# Altium footprint library SYNCBOX_TST.PcbLib: 267 footprints (part 13 of 17)
Each footprint in its own frame and in the unit in brackets; x right, y up, seen from the top. Pads: shape width x height; smd on the part's side, far side on the other; paste and mask are expansions set on the pad; w line width, h text height; cw(c..) or ccw(c..) is an arc to the next point about the centre after c.
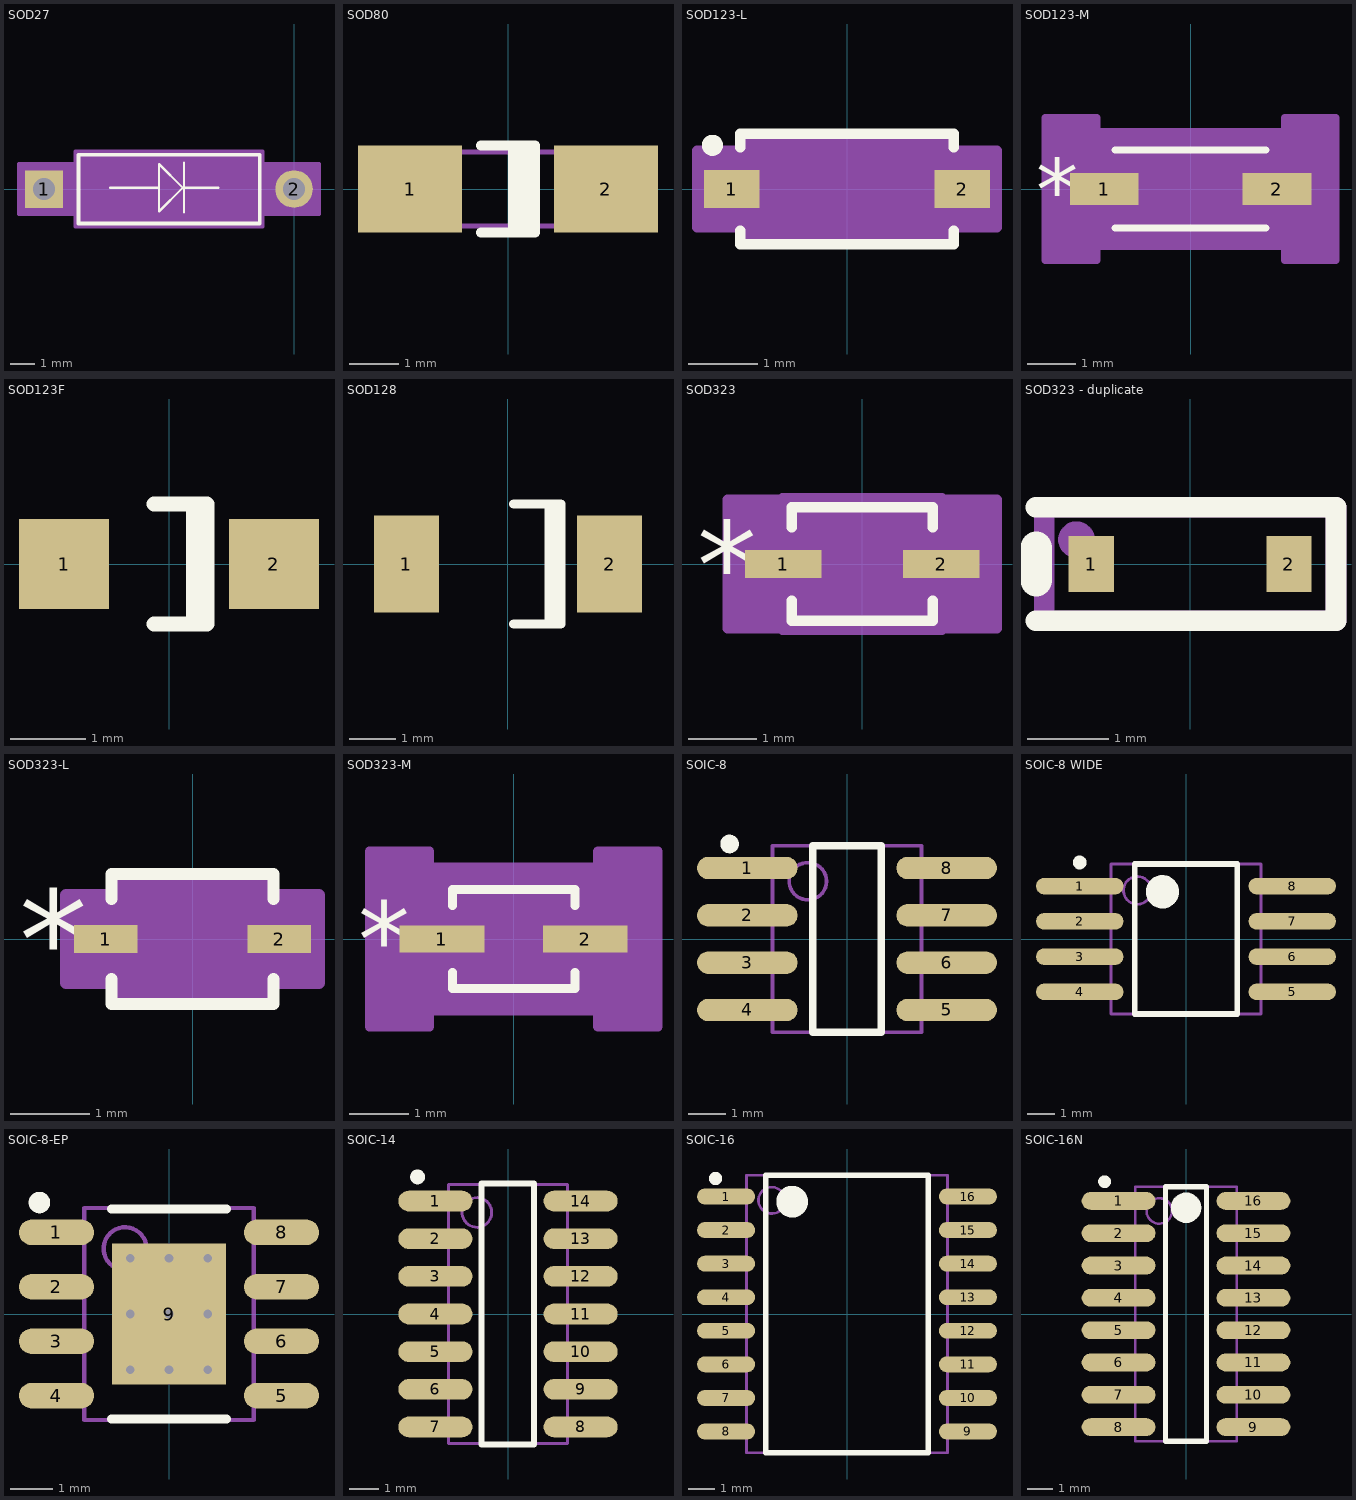
[diagram p12: the footprints below, top view; thin cyan lines are the x and y axes]

## SOD27 [mil]
pads (2):
  rect 60x60 / inner round 60 / far side rect 60x60 hole 35 paste+0 mask+0: 1(-400,0)
  round 60 hole 35 paste+0 mask+0: 2(0,0)
Top Overlay:
  lines w3.94: -294,2 -216,2 ; -176,-37 -176,42 ; -121,2 -178,2 ; -178,2 -216,40 -216,-36 -178,2
  lines w6: -345,-55 -55,-55 -55,55 -345,55 -345,-55
Mechanical 13:
  lines w1: -400,0 -340,0 ; -60,0 0,0 ; -340,-50 -60,-50 -60,50 -340,50 -340,-50
Mechanical 15:
  region: -350,-40 -440,-40 -440,40 -350,40 -350,60 -50,60 -50,40 40,40 40,-40 -50,-40 -50,-60 -350,-60
  lines w6: -440,-40 -440,40 -350,40 -350,60 -50,60 -50,40 40,40 40,-40 -50,-40 -50,-60 -350,-60 -350,-40 -440,-40
3D body: height 10, standoff 0, extent 0,0 10,10
3D body "SOD27.stp": height 100, standoff -110, extent -415,-50 15,50

## SOD80 [mm] "MELF Diode, 2-Leads, Body 3,4x1,4mm, IPC Low Density"
height 1.5
pads (2):
  rect 2.1x1.75 smd: 1(-1.975,0) 2(1.975,0)
Top Overlay:
  rectangle: 0,-0.875 0.55,0.875
  lines w0.2: -0.55,-0.875 0.55,-0.875 0.55,0.875 -0.55,0.875
Mechanical 13:
  rectangle: 1.316,-0.75 1.8,0.75
  lines w0.1: -1.8,-0.75 1.8,-0.75 1.8,0.75 -1.8,0.75 -1.8,-0.75
3D body: height 1.5, standoff 0, extent -1.8,-0.75 1.8,0.75

## SOD123-L [mm]
pads (2):
  rect 0.806x0.55 smd paste+0 mask+0: 1(-1.674,0) 2(1.674,0)
Top Overlay:
  circle w0.254: c-1.956,0.635 r0.025
  lines w0.152: -1.552,-0.608 -1.552,-0.802 1.552,-0.802 1.552,-0.608 ; -1.552,0.608 -1.552,0.802 1.552,0.802 1.552,0.608
Mechanical 13:
  lines w0.025: -1.425,-0.337 -1.087,-0.675 ; -1.425,0.337 -1.087,0.675 ; -1.925,-0.275 -1.425,-0.275 -1.425,0.275 -1.925,0.275 -1.925,-0.275 ; -1.425,-0.675 -1.425,0.675 1.425,0.675 1.425,-0.675 -1.425,-0.675 ; 1.425,-0.275 1.925,-0.275 1.925,0.275 1.425,0.275 1.425,-0.275
  text "*" at -1.488,-0.635 h1.27
Mechanical 15:
  region: -1.527,-0.556 -2.179,-0.556 -2.179,0.556 -1.527,0.556 -1.527,0.777 1.527,0.777 1.527,0.556 2.179,0.556 2.179,-0.556 1.527,-0.556 1.527,-0.777 -1.527,-0.777
  lines w0.152: -2.179,-0.556 -1.527,-0.556 -1.527,-0.777 1.527,-0.777 1.527,-0.556 2.179,-0.556 2.179,0.556 1.527,0.556 1.527,0.777 -1.527,0.777 -1.527,0.556 -2.179,0.556 -2.179,-0.556
3D body "SOD123-L.stp": height 0.81, standoff 0, extent -1.925,-0.675 1.925,0.675
3D body: height 0.25, standoff 0, extent 0,0 0.254,0.254

## SOD123-M [mm]
pads (2):
  rect 1.416x0.652 smd paste+0 mask+0: 1(-1.776,0) 2(1.776,0)
Top Overlay:
  lines w0.152: -1.552,-0.802 1.552,-0.802 ; -1.552,0.802 1.552,0.802
  text "*" at -3.182,-0.635 h1.27
Mechanical 13:
  lines w0.025: -1.425,-0.337 -1.087,-0.675 ; -1.425,0.337 -1.087,0.675 ; -1.925,-0.275 -1.925,0.275 -1.425,0.275 -1.425,-0.275 -1.925,-0.275 ; -1.425,-0.675 1.425,-0.675 1.425,0.675 -1.425,0.675 -1.425,-0.675 ; 1.425,-0.275 1.425,0.275 1.925,0.275 1.925,-0.275 1.425,-0.275
  text "*" at -1.488,-0.635 h1.27
Mechanical 15:
  region: -1.933,-1.47 -2.992,-1.47 -2.992,1.47 -1.933,1.47 -1.933,1.183 1.933,1.183 1.933,1.47 2.992,1.47 2.992,-1.47 1.933,-1.47 1.933,-1.183 -1.933,-1.183
  lines w0.152: -2.992,-1.47 -2.992,1.47 -1.933,1.47 -1.933,1.183 1.933,1.183 1.933,1.47 2.992,1.47 2.992,-1.47 1.933,-1.47 1.933,-1.183 -1.933,-1.183 -1.933,-1.47 -2.992,-1.47
3D body: height 0.25, standoff 0, extent 0,0 0.254,0.254
3D body "SOD123-M.stp": height 0.81, standoff 0, extent -1.925,-0.675 1.925,0.675

## SOD123F [mm] "1.6 x 2.6 BODY"
height 1.2
pads (2):
  rect 1.2x1.2 smd: 1(-1.4,0) 2(1.4,0)
Top Overlay:
  lines w0.2: -0.2,-0.8 0.508,-0.8 0.508,0.8 -0.2,0.8 ; 0.325,-0.8 0.325,0.8
3D body "CGRKM.stp": height 1.7, standoff 0, extent -1.854,-0.902 1.854,0.902

## SOD128 [mm] "2.5 x 3.8MM BODY"
height 1.1
pads (2):
  rect 1.4x2.1 smd: 1(-2.2,0) 2(2.2,0)
Top Overlay:
  lines w0.2: 0.127,-1.3 1.143,-1.3 ; 0.127,1.3 1.143,1.3 1.143,-1.3 ; 0.889,-1.3 0.889,1.3 1.016,1.173 1.016,-1.173 1.143,-1.3
3D body: height 1.1, standoff 0, extent -2.159,-1.397 2.159,1.397

## SOD323 [mm]
pads (2):
  rect 1.111x0.401 smd paste+0 mask+0: 1(-1.15,0) 2(1.15,0)
Top Overlay:
  lines w0.152: -1.027,-0.533 -1.027,-0.827 1.027,-0.827 1.027,-0.533 ; -1.027,0.533 -1.027,0.827 1.027,0.827 1.027,0.533
  text "*" at -2.404,-0.635 h1.27
Mechanical 13:
  lines w0.025: -0.9,-0.35 -0.55,-0.7 ; -0.9,0.35 -0.55,0.7 ; -1.35,-0.175 -1.35,0.175 -0.9,0.175 -0.9,-0.175 -1.35,-0.175 ; -0.9,-0.7 0.9,-0.7 0.9,0.7 -0.9,0.7 -0.9,-0.7 ; 0.9,-0.175 0.9,0.175 1.35,0.175 1.35,-0.175 0.9,-0.175
  text "*" at -0.964,-0.635 h1.27
Mechanical 15:
  region: -1.154,-0.937 -1.96,-0.937 -1.96,0.937 -1.154,0.937 -1.154,0.954 1.154,0.954 1.154,0.937 1.96,0.937 1.96,-0.937 1.154,-0.937 1.154,-0.954 -1.154,-0.954
  lines w0.152: -1.96,-0.937 -1.96,0.937 -1.154,0.937 -1.154,0.954 1.154,0.954 1.154,0.937 1.96,0.937 1.96,-0.937 1.154,-0.937 1.154,-0.954 -1.154,-0.954 -1.154,-0.937 -1.96,-0.937
3D body: height 0.25, standoff 0, extent 0,0 0.254,0.254
3D body "SOD323.stp": height 0.81, standoff 0, extent -1.35,-0.7 1.35,0.7

## SOD323 - duplicate [mil]
pads (2):
  rect 22x27 smd mask+3: 1(-48,0) 2(48,0)
Top Overlay:
  lines w10: -74.8,-27.56 70.87,-27.56 70.87,27.56 -74.8,27.56
  lines w15.75: -74.8,-7.87 -74.8,7.87
Mechanical 16:
  circle w10: c-55.12,11.81 r3.94
  lines w10: -70.87,-27.56 70.87,-27.56 70.87,27.56 -70.87,27.56 -70.87,-27.56
Mechanical 29:
  text ".Designator" at -7.87,-7.87 h15.75
3D body "SOD323.step": height 38.78, standoff -0.2, extent -49.21,-24.6 49.21,24.61

## SOD323-L [mm]
pads (2):
  rect 0.806x0.35 smd paste+0 mask+0: 1(-1.099,0) 2(1.099,0)
Top Overlay:
  lines w0.152: -1.027,-0.508 -1.027,-0.827 1.027,-0.827 1.027,-0.508 ; -1.027,0.508 -1.027,0.827 1.027,0.827 1.027,0.508
  text "*" at -2.201,-0.635 h1.27
Mechanical 13:
  lines w0.025: -0.9,-0.35 -0.55,-0.7 ; -0.9,0.35 -0.55,0.7 ; -1.35,-0.175 -0.9,-0.175 -0.9,0.175 -1.35,0.175 -1.35,-0.175 ; -0.9,-0.7 -0.9,0.7 0.9,0.7 0.9,-0.7 -0.9,-0.7 ; 0.9,-0.175 1.35,-0.175 1.35,0.175 0.9,0.175 0.9,-0.175
  text "*" at -0.964,-0.635 h1.27
Mechanical 15:
  region: -1.002,-0.556 -1.604,-0.556 -1.604,0.556 -1.002,0.556 -1.002,0.802 1.002,0.802 1.002,0.556 1.604,0.556 1.604,-0.556 1.002,-0.556 1.002,-0.802 -1.002,-0.802
  lines w0.152: -1.604,-0.556 -1.002,-0.556 -1.002,-0.802 1.002,-0.802 1.002,-0.556 1.604,-0.556 1.604,0.556 1.002,0.556 1.002,0.802 -1.002,0.802 -1.002,0.556 -1.604,0.556 -1.604,-0.556
3D body "SOD323-L.stp": height 0.81, standoff 0, extent -1.35,-0.7 1.35,0.7
3D body: height 0.25, standoff 0, extent 0,0 0.254,0.254

## SOD323-M [mm]
pads (2):
  rect 1.416x0.452 smd paste+0 mask+0: 1(-1.201,0) 2(1.201,0)
Top Overlay:
  lines w0.152: -1.027,-0.559 -1.027,-0.827 1.027,-0.827 1.027,-0.559 ; -1.027,0.559 -1.027,0.827 1.027,0.827 1.027,0.559
  text "*" at -2.607,-0.635 h1.27
Mechanical 13:
  lines w0.025: -0.9,-0.35 -0.55,-0.7 ; -0.9,0.35 -0.55,0.7 ; -1.35,-0.175 -1.35,0.175 -0.9,0.175 -0.9,-0.175 -1.35,-0.175 ; -0.9,-0.7 0.9,-0.7 0.9,0.7 -0.9,0.7 -0.9,-0.7 ; 0.9,-0.175 0.9,0.175 1.35,0.175 1.35,-0.175 0.9,-0.175
  text "*" at -0.964,-0.635 h1.27
Mechanical 15:
  region: -1.408,-1.47 -2.417,-1.47 -2.417,1.47 -1.408,1.47 -1.408,1.208 1.408,1.208 1.408,1.47 2.417,1.47 2.417,-1.47 1.408,-1.47 1.408,-1.208 -1.408,-1.208
  lines w0.152: -2.417,-1.47 -2.417,1.47 -1.408,1.47 -1.408,1.208 1.408,1.208 1.408,1.47 2.417,1.47 2.417,-1.47 1.408,-1.47 1.408,-1.208 -1.408,-1.208 -1.408,-1.47 -2.417,-1.47
3D body: height 0.25, standoff 0, extent 0,0 0.254,0.254
3D body "SOD323-M.stp": height 0.81, standoff 0, extent -1.35,-0.7 1.35,0.7

## SOIC-8 [mm] "3.9 x 6.0 MM BODY, 1.27MM PITCH"
height 1.75
pads (8):
  oval 2.7x0.6 smd: 1(-2.675,1.905) 2(-2.675,0.635) 3(-2.675,-0.635) 4(-2.675,-1.905) 5(2.675,-1.905) 6(2.675,-0.635) 7(2.675,0.635) 8(2.675,1.905)
Top Overlay:
  circle w0.25: c-3.15,2.55 r0.125
  lines w0.2: -0.925,-2.5 0.925,-2.5 0.925,2.5 -0.925,2.5 -0.925,-2.5
Mechanical 13:
  circle w0.1: c-1.05,1.55 r0.5
  lines w0.1: -2,-2.5 2,-2.5 2,2.5 -2,2.5 -2,-2.5
3D body: height 1.75, standoff 0.1, extent -2,-2.5 2,2.5

## SOIC-8 WIDE [mm] "SOIC, 8-Leads, Body 5.4x5.4mm (max), Pitch 1.27mm, IPC Medium Density"
height 2.16
pads (8):
  oval 3.15x0.6 smd: 1(-3.825,1.905) 2(-3.825,0.635) 3(-3.825,-0.635) 4(-3.825,-1.905) 5(3.825,-1.905) 6(3.825,-0.635) 7(3.825,0.635) 8(3.825,1.905)
Top Overlay:
  circle w0.25: c-3.825,2.755 r0.125
  circle w0.6: c-0.85,1.7 r0.3
  lines w0.2: -1.85,-2.7 -1.85,2.7 1.85,2.7 1.85,-2.7 -1.85,-2.7
Mechanical 13:
  circle w0.1: c-1.75,1.75 r0.5
  lines w0.1: -2.7,-2.7 -2.7,2.7 2.7,2.7 2.7,-2.7 -2.7,-2.7
3D body: height 2.16, standoff 0.05, extent -2.7,-2.7 2.7,2.7

## SOIC-8-EP [mm]
height 1.5
pads (9):
  oval 1.75x0.6 smd: 1(-2.625,1.905) 2(-2.625,0.635) 3(-2.625,-0.635) 4(-2.625,-1.905) 5(2.625,-1.905) 6(2.625,-0.635) 7(2.625,0.635) 8(2.625,1.905)
  rect 2.66x3.3 smd: 9(0,0)
via 0.9,1.3 diameter 0.66 hole 0.2
via 0,-1.3 diameter 0.66 hole 0.2
via 0,0 diameter 0.66 hole 0.2
via 0,1.3 diameter 0.66 hole 0.2
via 0.9,-1.3 diameter 0.66 hole 0.2
via -0.9,-1.3 diameter 0.66 hole 0.2
via 0.9,0 diameter 0.66 hole 0.2
via -0.9,0 diameter 0.66 hole 0.2
via -0.9,1.3 diameter 0.66 hole 0.2
Top Overlay:
  circle w0.25: c-3.025,2.6 r0.125
  lines w0.2: -1.35,-2.45 1.35,-2.45 ; -1.35,2.45 1.35,2.45
Mechanical 13:
  circle w0.1: c-1.025,1.525 r0.5
  lines w0.1: -1.975,-2.475 1.975,-2.475 1.975,2.475 -1.975,2.475 -1.975,-2.475
3D body: height 1.5, standoff 0, extent -1.975,-2.475 1.975,2.475

## SOIC-14 [mm]
height 1.75
pads (14):
  oval 2.5x0.7 smd: 1(-2.45,3.81) 2(-2.45,2.54) 3(-2.45,1.27) 4(-2.45,0) 5(-2.45,-1.27) 6(-2.45,-2.54) 7(-2.45,-3.81) 8(2.45,-3.81) 9(2.45,-2.54) 10(2.45,-1.27) 11(2.45,0) 12(2.45,1.27) 13(2.45,2.54) 14(2.45,3.81)
Top Overlay:
  circle w0.25: c-3.05,4.625 r0.125
  lines w0.2: -0.9,-4.4 0.875,-4.4 0.875,4.4 -0.9,4.4 -0.9,-4.4
Mechanical 13:
  circle w0.1: c-1.05,3.425 r0.5
  lines w0.1: -2,-4.375 2,-4.375 2,4.375 -2,4.375 -2,-4.375
3D body: height 1.75, standoff 0.1, extent -2,-4.375 2,4.375

## SOIC-16 [mm]
height 2.65
pads (16):
  oval 2.2x0.6 smd: 1(-4.575,4.445) 2(-4.575,3.175) 3(-4.575,1.905) 4(-4.575,0.635) 5(-4.575,-0.635) 6(-4.575,-1.905) 7(-4.575,-3.175) 8(-4.575,-4.445) 9(4.575,-4.445) 10(4.575,-3.175) 11(4.575,-1.905) 12(4.575,-0.635) 13(4.575,0.635) 14(4.575,1.905) 15(4.575,3.175) 16(4.575,4.445)
Top Overlay:
  circle w0.6: c-2.075,4.25 r0.3
  circle w0.25: c-4.975,5.125 r0.125
  lines w0.2: -3.075,-5.25 3.075,-5.25 3.075,5.25 -3.075,5.25 -3.075,-5.25
Mechanical 13:
  circle w0.1: c-2.85,4.3 r0.5
  lines w0.1: -3.8,-5.25 3.8,-5.25 3.8,5.25 -3.8,5.25 -3.8,-5.25
3D body: height 2.65, standoff 0.1, extent -3.8,-5.25 3.8,5.25

## SOIC-16N [mm]
height 1.75
pads (16):
  oval 2.9x0.7 smd: 1(-2.65,4.445) 2(-2.65,3.175) 3(-2.65,1.905) 4(-2.65,0.635) 5(-2.65,-0.635) 6(-2.65,-1.905) 7(-2.65,-3.175) 8(-2.65,-4.445) 9(2.65,-4.445) 10(2.65,-3.175) 11(2.65,-1.905) 12(2.65,-0.635) 13(2.65,0.635) 14(2.65,1.905) 15(2.65,3.175) 16(2.65,4.445)
Top Overlay:
  circle w0.6: c0,4.175 r0.3
  circle w0.25: c-3.2,5.2 r0.125
  lines w0.2: -0.8,-5 -0.8,5 0.8,5 0.8,-5 -0.8,-5
Mechanical 13:
  circle w0.1: c-1.05,4.05 r0.5
  lines w0.1: -2,-5 -2,5 2,5 2,-5 -2,-5
3D body: height 1.75, standoff 0.1, extent -2,-5 2,5